# Altium footprint library SBC_PcbLib.PcbLib: 52 footprints (part 1 of 4)
Each footprint in its own frame and in the unit in brackets; x right, y up, seen from the top. Pads: shape width x height; smd on the part's side, far side on the other; paste and mask are expansions set on the pad; w line width, h text height; cw(c..) or ccw(c..) is an arc to the next point about the centre after c.
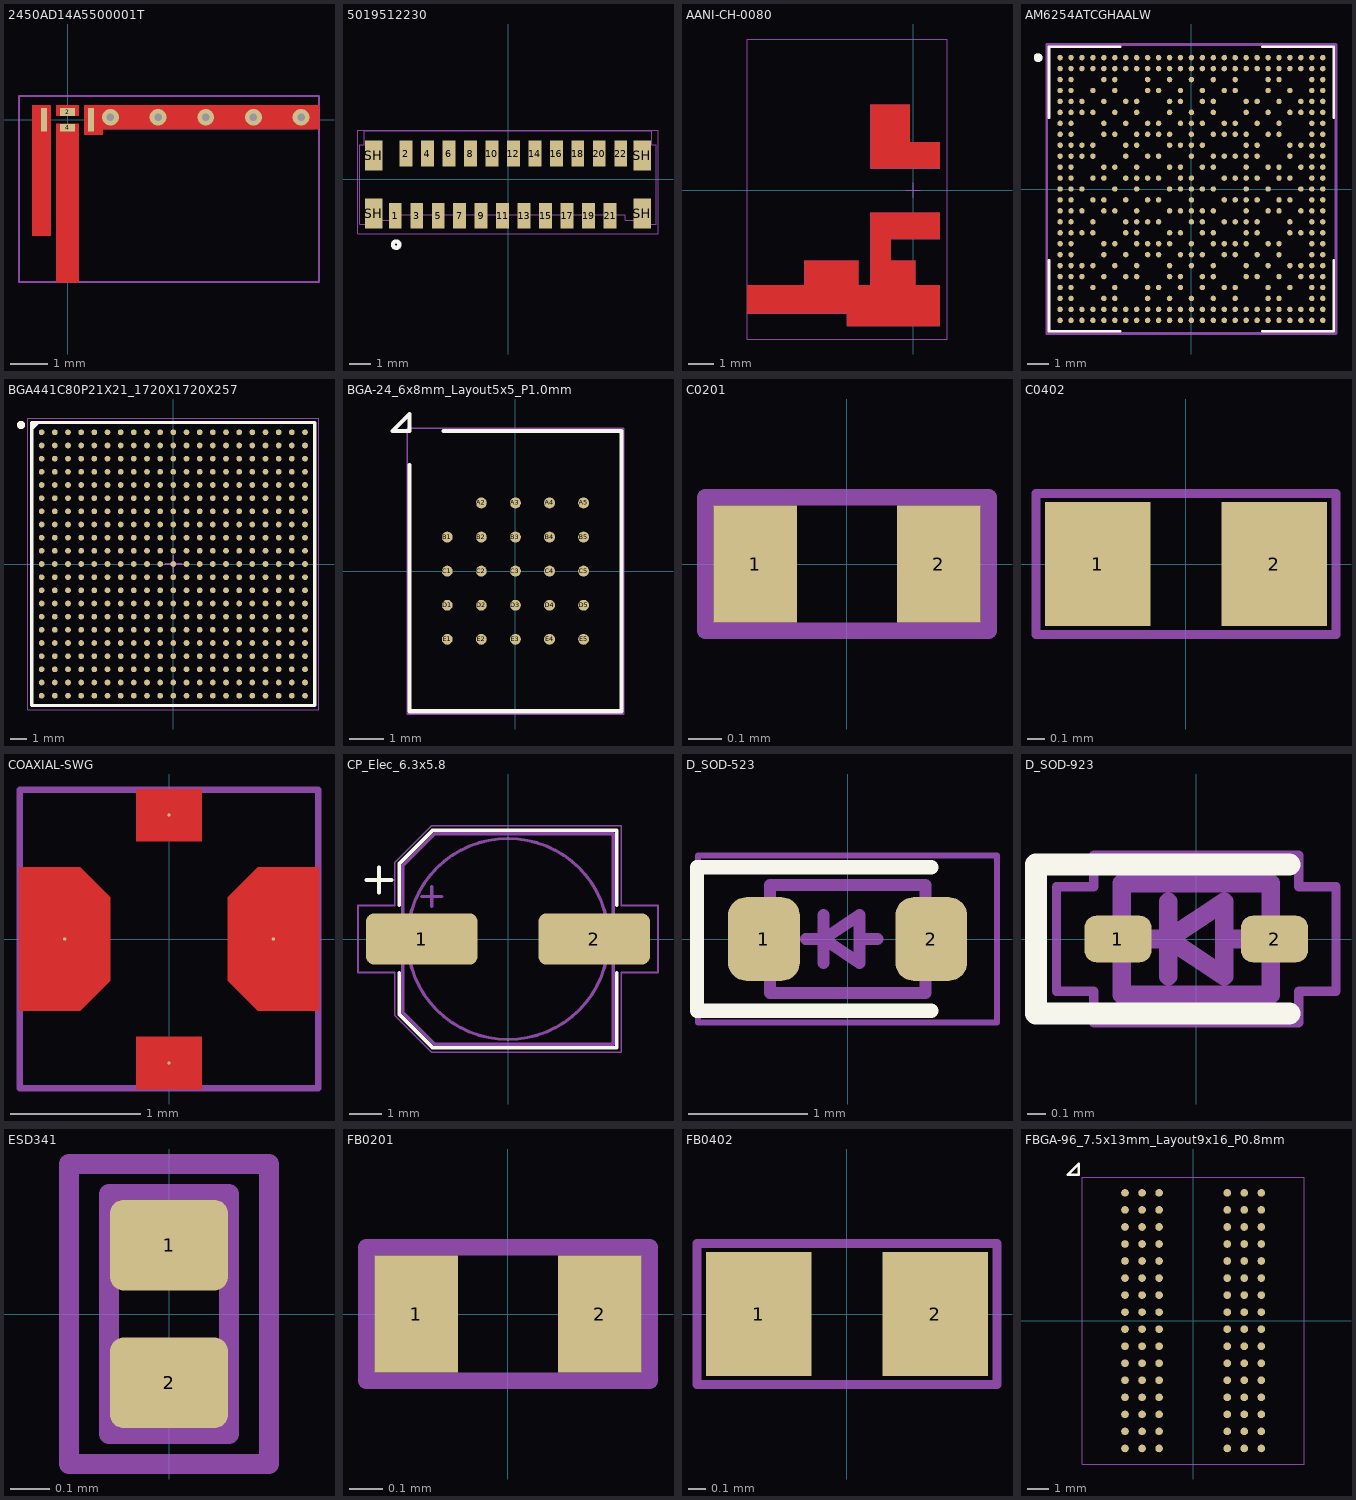
[diagram p0: the footprints below, top view; thin cyan lines are the x and y axes]

## 2450AD14A5500001T [mm]
pads (4):
  rect 0.165x0.63 smd: 1(0.633,0) 3(-0.633,0)
  rect 0.4x0.21 smd: 2(0,0.21) 4(0,-0.21)
via 1.15,0.07 diameter 0.45 hole 0.2
via 2.43,0.07 diameter 0.45 hole 0.2
via 3.71,0.07 diameter 0.45 hole 0.2
via 4.99,0.07 diameter 0.45 hole 0.2
via 6.27,0.07 diameter 0.45 hole 0.2
Top Layer:
  region: -0.95,-3.105 -0.95,0.395 -0.45,0.395 -0.45,-3.105
  region: -0.3,-4.355 0.3,-4.355 0.3,-0.105 -0.3,-0.105
  region: -0.3,0.105 -0.3,0.395 0.3,0.395 0.3,0.105
  region: 0.45,-0.405 0.95,-0.405 0.95,-0.255 6.75,-0.255 6.75,0.395 0.45,0.395
Bottom Layer:
  region: 0.95,-0.255 0.95,0.395 6.61,0.395 6.61,-0.255
Top Courtyard:
  lines w0.05: -1.303,-4.355 -1.303,0.645 6.747,0.645 6.747,-4.355 -1.303,-4.355
3D body "2450AD14A5500T--3DModel-STEP-56544.STEP": height 0.41, standoff 0.01, extent -0.8,-0.4 0.8,0.4

## 5019512230 [mm]
pads (26):
  rect 0.6x1.2 smd: 1(-5.25,-1.704) 2(-4.75,1.196) 3(-4.25,-1.704) 4(-3.75,1.196) 5(-3.25,-1.704) 6(-2.75,1.196) 7(-2.25,-1.704) 8(-1.75,1.196) 9(-1.25,-1.704) 10(-0.75,1.196) 11(-0.25,-1.704) 12(0.25,1.196) 13(0.75,-1.704) 14(1.25,1.196) 15(1.75,-1.704) 16(2.25,1.196) 17(2.75,-1.704) 18(3.25,1.196) 19(3.75,-1.704) 20(4.25,1.196) 21(4.75,-1.704) 22(5.25,1.196)
  rect 0.8x1.4 smd: SH(-6.25,-1.604) SH(-6.25,1.096) SH(6.25,-1.604) SH(6.25,1.096)
Top Overlay:
  circle w0.2: c-5.207,-3.048 r0.15
Top Courtyard:
  lines w0.05: -6.985,-2.54 -6.985,2.286 6.985,2.286 6.985,-2.54 -6.985,-2.54
Top Assembly:
  lines w0.05: -6.9,-2.104 -6.9,1.596 -6.7,1.596 -6.7,2.266 6.7,2.266 6.7,1.596 6.9,1.596 6.9,-2.104 6.35,-2.104 6.35,-2.004 6,-2.004 6,-1.904 5.45,-1.904 5.45,-1.654 -5.45,-1.654 -5.45,-1.904 -6,-1.904 -6,-2.004 -6.35,-2.004 -6.35,-2.104 -6.9,-2.104
3D body "5019512230.stp": height 4.61, standoff 0.01, extent -6.9,-2.411 6.9,1.723

## AANI-CH-0080 [mm]
Top Layer:
  region: -6.64,-4.915 -6.64,-3.805 -4.34,-3.805 -4.34,-2.815 -2.19,-2.815 -2.19,-3.805 -1.69,-3.805 -1.69,-0.895 1.06,-0.895 1.06,-1.925 -0.89,-1.925 -0.89,-2.815 0.1,-2.815 0.1,-3.805 1.06,-3.805 1.06,-5.415 -2.64,-5.415 -2.64,-4.915
  region: -1.69,0.895 -1.69,3.425 -0.14,3.425 -0.14,1.925 1.06,1.925 1.06,0.895
Top Courtyard:
  lines w0.013: -6.64,-4.915 -2.64,-4.915 -2.64,-5.415 1.06,-5.415 1.06,-4.915 1.06,-3.805 0.1,-3.805 0.1,-2.815 -0.89,-2.815 -0.89,-1.925 1.06,-1.925 1.06,-0.895 -0.89,-0.895 -1.69,-0.895 -1.69,-1.925 -1.69,-2.815 -1.69,-3.805 -2.19,-3.805 -2.19,-2.815 -4.34,-2.815 -4.34,-3.805 -6.64,-3.805 -6.64,-4.915 ; -1.69,0.895 1.06,0.895 1.06,1.925 -0.14,1.925 -0.14,3.425 -1.69,3.425 -1.69,1.925 -1.69,0.895
Bottom Courtyard:
  lines w0.013: -6.64,-5.945 -6.64,6.055 1.36,6.055 1.36,-5.945 -6.64,-5.945
Mechanical 5:
  lines w0.013: -0.3,0 0.3,0 ; 0,-0.3 0,0.3

## AM6254ATCGHAALW [mm]
height 0.89
pads (425):
  round 0.25 smd mask+0.05: A1(-6,6) A2(-5.5,6) A3(-5,6) A4(-4.5,6) A5(-4,6) A6(-3.5,6) A7(-3,6) A8(-2.5,6) A9(-2,6) A10(-1.5,6) A11(-1,6) A12(-0.5,6) A13(0,6) A14(0.5,6) A15(1,6) A16(1.5,6) A17(2,6) A18(2.5,6) A19(3,6) A20(3.5,6) A21(4,6) A22(4.5,6) A23(5,6) A24(5.5,6) A25(6,6) AA1(-6,-4) AA2(-5.5,-4) AA3(-5,-4) AA5(-4,-4) AA7(-3,-4) AA8(-2.5,-4) AA11(-1,-4) AA12(-0.5,-4) AA14(0.5,-4) AA15(1,-4) AA18(2.5,-4) AA19(3,-4) AA21(4,-4) AA23(5,-4) AA24(5.5,-4) AA25(6,-4) AB1(-6,-4.5) AB2(-5.5,-4.5) AB4(-4.5,-4.5) AB6(-3.5,-4.5) AB9(-2,-4.5) AB10(-1.5,-4.5) AB12(-0.5,-4.5) AB14(0.5,-4.5) AB16(1.5,-4.5) AB17(2,-4.5) AB20(3.5,-4.5) AB22(4.5,-4.5) AB24(5.5,-4.5) AB25(6,-4.5) AC1(-6,-5) AC2(-5.5,-5) AC5(-4,-5) AC6(-3.5,-5) AC9(-2,-5) AC11(-1,-5) AC13(0,-5) AC15(1,-5) AC17(2,-5) AC20(3.5,-5) AC21(4,-5) AC24(5.5,-5) AC25(6,-5) AD1(-6,-5.5) AD2(-5.5,-5.5) AD3(-5,-5.5) AD4(-4.5,-5.5) AD5(-4,-5.5) AD6(-3.5,-5.5) AD7(-3,-5.5) AD8(-2.5,-5.5) AD9(-2,-5.5) AD10(-1.5,-5.5) AD11(-1,-5.5) AD12(-0.5,-5.5) AD13(0,-5.5) AD14(0.5,-5.5) AD15(1,-5.5) AD16(1.5,-5.5) AD17(2,-5.5) AD18(2.5,-5.5) AD19(3,-5.5) AD20(3.5,-5.5) AD21(4,-5.5) AD22(4.5,-5.5) AD23(5,-5.5) AD24(5.5,-5.5) AD25(6,-5.5) AE1(-6,-6) AE2(-5.5,-6) AE3(-5,-6) AE4(-4.5,-6) AE5(-4,-6) AE6(-3.5,-6) AE7(-3,-6) AE8(-2.5,-6) AE9(-2,-6) AE10(-1.5,-6) AE11(-1,-6) AE12(-0.5,-6) AE13(0,-6) AE14(0.5,-6) AE15(1,-6) AE16(1.5,-6) AE17(2,-6) AE18(2.5,-6) AE19(3,-6) AE20(3.5,-6) AE21(4,-6) AE22(4.5,-6) AE23(5,-6) AE24(5.5,-6) AE25(6,-6) B1(-6,5.5) B2(-5.5,5.5) B3(-5,5.5) B4(-4.5,5.5) B5(-4,5.5) B6(-3.5,5.5) B7(-3,5.5) B8(-2.5,5.5) B9(-2,5.5) B10(-1.5,5.5) B11(-1,5.5) B12(-0.5,5.5) B13(0,5.5) B14(0.5,5.5) B15(1,5.5) B16(1.5,5.5) B17(2,5.5) B18(2.5,5.5) B19(3,5.5) B20(3.5,5.5) B21(4,5.5) B22(4.5,5.5) B23(5,5.5) B24(5.5,5.5) B25(6,5.5) C1(-6,5) C2(-5.5,5) C5(-4,5) C6(-3.5,5) C9(-2,5) C11(-1,5) C13(0,5) C15(1,5) C17(2,5) C20(3.5,5) C21(4,5) C24(5.5,5) C25(6,5) D1(-6,4.5) D2(-5.5,4.5) D4(-4.5,4.5) D6(-3.5,4.5) D9(-2,4.5) D10(-1.5,4.5) D12(-0.5,4.5) D14(0.5,4.5) D16(1.5,4.5) D17(2,4.5) D20(3.5,4.5) D22(4.5,4.5) D24(5.5,4.5) D25(6,4.5) E1(-6,4) E2(-5.5,4) E3(-5,4) E5(-4,4) E7(-3,4) E8(-2.5,4) E11(-1,4) E12(-0.5,4) E14(0.5,4) E15(1,4) E18(2.5,4) E19(3,4) E21(4,4) E23(5,4) E24(5.5,4) E25(6,4) F1(-6,3.5) F2(-5.5,3.5) F3(-5,3.5) F4(-4.5,3.5) F6(-3.5,3.5) F8(-2.5,3.5) F11(-1,3.5) F13(0,3.5) F15(1,3.5) F18(2.5,3.5) F20(3.5,3.5) F22(4.5,3.5) F23(5,3.5) F24(5.5,3.5) F25(6,3.5) G1(-6,3) G2(-5.5,3) G5(-4,3) G7(-3,3) G9(-2,3) G10(-1.5,3) G12(-0.5,3) G13(0,3) G14(0.5,3) G16(1.5,3) G17(2,3) G19(3,3) G21(4,3) G24(5.5,3) G25(6,3) H1(-6,2.5) H2(-5.5,2.5) H5(-4,2.5) H6(-3.5,2.5) H8(-2.5,2.5) H9(-2,2.5) H10(-1.5,2.5) H11(-1,2.5) H13(0,2.5) H15(1,2.5) H16(1.5,2.5) H17(2,2.5) H18(2.5,2.5) H20(3.5,2.5) H21(4,2.5) H24(5.5,2.5) H25(6,2.5) J1(-6,2) J2(-5.5,2) J3(-5,2) J4(-4.5,2) J7(-3,2) J8(-2.5,2) J11(-1,2) J12(-0.5,2) J13(0,2) J14(0.5,2) J18(2.5,2) J19(3,2) J22(4.5,2) J23(5,2) J24(5.5,2) J25(6,2) K1(-6,1.5) K2(-5.5,1.5) K3(-5,1.5) K4(-4.5,1.5) K7(-3,1.5) K9(-2,1.5) K10(-1.5,1.5) K13(0,1.5) K15(1,1.5) K16(1.5,1.5) K17(2,1.5) K18(2.5,1.5) K19(3,1.5) K22(4.5,1.5) K24(5.5,1.5) K25(6,1.5) L1(-6,1) L2(-5.5,1) L5(-4,1) L6(-3.5,1) L8(-2.5,1) L11(-1,1) L12(-0.5,1) L14(0.5,1) L15(1,1) L18(2.5,1) L20(3.5,1) L21(4,1) L23(5,1) L24(5.5,1) L25(6,1) M1(-6,0.5) M2(-5.5,0.5) M4(-4.5,0.5) M5(-4,0.5) M7(-3,0.5) M8(-2.5,0.5) M9(-2,0.5) M10(-1.5,0.5) M12(-0.5,0.5) M13(0,0.5) M16(1.5,0.5) M17(2,0.5) M18(2.5,0.5) M19(3,0.5) M21(4,0.5) M22(4.5,0.5) M24(5.5,0.5) M25(6,0.5) N1(-6,0) N2(-5.5,0) N3(-5,0) N6(-3.5,0) N8(-2.5,0) N11(-1,0) N12(-0.5,0) N13(0,0) N14(0.5,0) N15(1,0) N18(2.5,0) N20(3.5,0) N23(5,0) N24(5.5,0) N25(6,0) P1(-6,-0.5) P2(-5.5,-0.5) P4(-4.5,-0.5) P5(-4,-0.5) P7(-3,-0.5) P9(-2,-0.5) P10(-1.5,-0.5) P13(0,-0.5) P16(1.5,-0.5) P17(2,-0.5) P18(2.5,-0.5) P19(3,-0.5) P21(4,-0.5) P22(4.5,-0.5) P24(5.5,-0.5) P25(6,-0.5) R1(-6,-1) R2(-5.5,-1) R3(-5,-1) R5(-4,-1) R6(-3.5,-1) R8(-2.5,-1) R11(-1,-1) R12(-0.5,-1) R13(0,-1) R14(0.5,-1) R15(1,-1) R18(2.5,-1) R20(3.5,-1) R21(4,-1) R23(5,-1) R24(5.5,-1) R25(6,-1) T1(-6,-1.5) T2(-5.5,-1.5) T4(-4.5,-1.5) T7(-3,-1.5) T8(-2.5,-1.5) T9(-2,-1.5) T10(-1.5,-1.5) T13(0,-1.5) T14(0.5,-1.5) T16(1.5,-1.5) T17(2,-1.5) T18(2.5,-1.5) T19(3,-1.5) T22(4.5,-1.5) T24(5.5,-1.5) T25(6,-1.5) U1(-6,-2) U2(-5.5,-2) U3(-5,-2) U4(-4.5,-2) U7(-3,-2) U8(-2.5,-2) U11(-1,-2) U12(-0.5,-2) U14(0.5,-2) U15(1,-2) U18(2.5,-2) U19(3,-2) U22(4.5,-2) U23(5,-2) U24(5.5,-2) U25(6,-2) V1(-6,-2.5) V2(-5.5,-2.5) V5(-4,-2.5) V6(-3.5,-2.5) V8(-2.5,-2.5) V9(-2,-2.5) V10(-1.5,-2.5) V11(-1,-2.5) V13(0,-2.5) V15(1,-2.5) V16(1.5,-2.5) V17(2,-2.5) V18(2.5,-2.5) V20(3.5,-2.5) V21(4,-2.5) V24(5.5,-2.5) V25(6,-2.5) W1(-6,-3) W2(-5.5,-3) W5(-4,-3) W7(-3,-3) W9(-2,-3) W10(-1.5,-3) W12(-0.5,-3) W13(0,-3) W14(0.5,-3) W16(1.5,-3) W17(2,-3) W19(3,-3) W21(4,-3) W24(5.5,-3) W25(6,-3) Y1(-6,-3.5) Y2(-5.5,-3.5) Y3(-5,-3.5) Y4(-4.5,-3.5) Y6(-3.5,-3.5) Y8(-2.5,-3.5) Y11(-1,-3.5) Y13(0,-3.5) Y15(1,-3.5) Y18(2.5,-3.5) Y20(3.5,-3.5) Y22(4.5,-3.5) Y23(5,-3.5) Y24(5.5,-3.5) Y25(6,-3.5)
Top Overlay:
  circle w0.2: c-7,6 r0.1
  lines w0.127: -6.5,-3.25 -6.5,-6.5 -3.25,-6.5 ; -6.5,3.25 -6.5,6.5 -3.25,6.5 ; 3.25,-6.5 6.5,-6.5 6.5,-3.25 ; 3.25,6.5 6.5,6.5 6.5,3.25
Top Courtyard:
  lines w0.127: -6.604,-6.604 -6.604,6.604 6.604,6.604 6.604,-6.604 -6.604,-6.604
Top 3D Body:
  circle w0.2: c-7,6 r0.1
3D body "AM6254ATCGHAALW.step": height 0.89, standoff 0, extent -6.5,-6.5 6.5,6.5

## BGA441C80P21X21_1720X1720X257 [mm] "BGA, 441-Leads, Body 17.20x17.20mmx2.57mm, Pitch 0.80mm"
height 2.57
pads (441):
  round 0.35 smd: A1(-8,8) A2(-7.2,8) A3(-6.4,8) A4(-5.6,8) A5(-4.8,8) A6(-4,8) A7(-3.2,8) A8(-2.4,8) A9(-1.6,8) A10(-0.8,8) A11(0,8) A12(0.8,8) A13(1.6,8) A14(2.4,8) A15(3.2,8) A16(4,8) A17(4.8,8) A18(5.6,8) A19(6.4,8) A20(7.2,8) A21(8,8) AA1(-8,-8) AA2(-7.2,-8) AA3(-6.4,-8) AA4(-5.6,-8) AA5(-4.8,-8) AA6(-4,-8) AA7(-3.2,-8) AA8(-2.4,-8) AA9(-1.6,-8) AA10(-0.8,-8) AA11(0,-8) AA12(0.8,-8) AA13(1.6,-8) AA14(2.4,-8) AA15(3.2,-8) AA16(4,-8) AA17(4.8,-8) AA18(5.6,-8) AA19(6.4,-8) AA20(7.2,-8) AA21(8,-8) B1(-8,7.2) B2(-7.2,7.2) B3(-6.4,7.2) B4(-5.6,7.2) B5(-4.8,7.2) B6(-4,7.2) B7(-3.2,7.2) B8(-2.4,7.2) B9(-1.6,7.2) B10(-0.8,7.2) B11(0,7.2) B12(0.8,7.2) B13(1.6,7.2) B14(2.4,7.2) B15(3.2,7.2) B16(4,7.2) B17(4.8,7.2) B18(5.6,7.2) B19(6.4,7.2) B20(7.2,7.2) B21(8,7.2) C1(-8,6.4) C2(-7.2,6.4) C3(-6.4,6.4) C4(-5.6,6.4) C5(-4.8,6.4) C6(-4,6.4) C7(-3.2,6.4) C8(-2.4,6.4) C9(-1.6,6.4) C10(-0.8,6.4) C11(0,6.4) C12(0.8,6.4) C13(1.6,6.4) C14(2.4,6.4) C15(3.2,6.4) C16(4,6.4) C17(4.8,6.4) C18(5.6,6.4) C19(6.4,6.4) C20(7.2,6.4) C21(8,6.4) D1(-8,5.6) D2(-7.2,5.6) D3(-6.4,5.6) D4(-5.6,5.6) D5(-4.8,5.6) D6(-4,5.6) D7(-3.2,5.6) D8(-2.4,5.6) D9(-1.6,5.6) D10(-0.8,5.6) D11(0,5.6) D12(0.8,5.6) D13(1.6,5.6) D14(2.4,5.6) D15(3.2,5.6) D16(4,5.6) D17(4.8,5.6) D18(5.6,5.6) D19(6.4,5.6) D20(7.2,5.6) D21(8,5.6) E1(-8,4.8) E2(-7.2,4.8) E3(-6.4,4.8) E4(-5.6,4.8) E5(-4.8,4.8) E6(-4,4.8) E7(-3.2,4.8) E8(-2.4,4.8) E9(-1.6,4.8) E10(-0.8,4.8) E11(0,4.8) E12(0.8,4.8) E13(1.6,4.8) E14(2.4,4.8) E15(3.2,4.8) E16(4,4.8) E17(4.8,4.8) E18(5.6,4.8) E19(6.4,4.8) E20(7.2,4.8) E21(8,4.8) F1(-8,4) F2(-7.2,4) F3(-6.4,4) F4(-5.6,4) F5(-4.8,4) F6(-4,4) F7(-3.2,4) F8(-2.4,4) F9(-1.6,4) F10(-0.8,4) F11(0,4) F12(0.8,4) F13(1.6,4) F14(2.4,4) F15(3.2,4) F16(4,4) F17(4.8,4) F18(5.6,4) F19(6.4,4) F20(7.2,4) F21(8,4) G1(-8,3.2) G2(-7.2,3.2) G3(-6.4,3.2) G4(-5.6,3.2) G5(-4.8,3.2) G6(-4,3.2) G7(-3.2,3.2) G8(-2.4,3.2) G9(-1.6,3.2) G10(-0.8,3.2) G11(0,3.2) G12(0.8,3.2) G13(1.6,3.2) G14(2.4,3.2) G15(3.2,3.2) G16(4,3.2) G17(4.8,3.2) G18(5.6,3.2) G19(6.4,3.2) G20(7.2,3.2) G21(8,3.2) H1(-8,2.4) H2(-7.2,2.4) H3(-6.4,2.4) H4(-5.6,2.4) H5(-4.8,2.4) H6(-4,2.4) H7(-3.2,2.4) H8(-2.4,2.4) H9(-1.6,2.4) H10(-0.8,2.4) H11(0,2.4) H12(0.8,2.4) H13(1.6,2.4) H14(2.4,2.4) H15(3.2,2.4) H16(4,2.4) H17(4.8,2.4) H18(5.6,2.4) H19(6.4,2.4) H20(7.2,2.4) H21(8,2.4) J1(-8,1.6) J2(-7.2,1.6) J3(-6.4,1.6) J4(-5.6,1.6) J5(-4.8,1.6) J6(-4,1.6) J7(-3.2,1.6) J8(-2.4,1.6) J9(-1.6,1.6) J10(-0.8,1.6) J11(0,1.6) J12(0.8,1.6) J13(1.6,1.6) J14(2.4,1.6) J15(3.2,1.6) J16(4,1.6) J17(4.8,1.6) J18(5.6,1.6) J19(6.4,1.6) J20(7.2,1.6) J21(8,1.6) K1(-8,0.8) K2(-7.2,0.8) K3(-6.4,0.8) K4(-5.6,0.8) K5(-4.8,0.8) K6(-4,0.8) K7(-3.2,0.8) K8(-2.4,0.8) K9(-1.6,0.8) K10(-0.8,0.8) K11(0,0.8) K12(0.8,0.8) K13(1.6,0.8) K14(2.4,0.8) K15(3.2,0.8) K16(4,0.8) K17(4.8,0.8) K18(5.6,0.8) K19(6.4,0.8) K20(7.2,0.8) K21(8,0.8) L1(-8,0) L2(-7.2,0) L3(-6.4,0) L4(-5.6,0) L5(-4.8,0) L6(-4,0) L7(-3.2,0) L8(-2.4,0) L9(-1.6,0) L10(-0.8,0) L11(0,0) L12(0.8,0) L13(1.6,0) L14(2.4,0) L15(3.2,0) L16(4,0) L17(4.8,0) L18(5.6,0) L19(6.4,0) L20(7.2,0) L21(8,0) M1(-8,-0.8) M2(-7.2,-0.8) M3(-6.4,-0.8) M4(-5.6,-0.8) M5(-4.8,-0.8) M6(-4,-0.8) M7(-3.2,-0.8) M8(-2.4,-0.8) M9(-1.6,-0.8) M10(-0.8,-0.8) M11(0,-0.8) M12(0.8,-0.8) M13(1.6,-0.8) M14(2.4,-0.8) M15(3.2,-0.8) M16(4,-0.8) M17(4.8,-0.8) M18(5.6,-0.8) M19(6.4,-0.8) M20(7.2,-0.8) M21(8,-0.8) N1(-8,-1.6) N2(-7.2,-1.6) N3(-6.4,-1.6) N4(-5.6,-1.6) N5(-4.8,-1.6) N6(-4,-1.6) N7(-3.2,-1.6) N8(-2.4,-1.6) N9(-1.6,-1.6) N10(-0.8,-1.6) N11(0,-1.6) N12(0.8,-1.6) N13(1.6,-1.6) N14(2.4,-1.6) N15(3.2,-1.6) N16(4,-1.6) N17(4.8,-1.6) N18(5.6,-1.6) N19(6.4,-1.6) N20(7.2,-1.6) N21(8,-1.6) P1(-8,-2.4) P2(-7.2,-2.4) P3(-6.4,-2.4) P4(-5.6,-2.4) P5(-4.8,-2.4) P6(-4,-2.4) P7(-3.2,-2.4) P8(-2.4,-2.4) P9(-1.6,-2.4) P10(-0.8,-2.4) P11(0,-2.4) P12(0.8,-2.4) P13(1.6,-2.4) P14(2.4,-2.4) P15(3.2,-2.4) P16(4,-2.4) P17(4.8,-2.4) P18(5.6,-2.4) P19(6.4,-2.4) P20(7.2,-2.4) P21(8,-2.4) R1(-8,-3.2) R2(-7.2,-3.2) R3(-6.4,-3.2) R4(-5.6,-3.2) R5(-4.8,-3.2) R6(-4,-3.2) R7(-3.2,-3.2) R8(-2.4,-3.2) R9(-1.6,-3.2) R10(-0.8,-3.2) R11(0,-3.2) R12(0.8,-3.2) R13(1.6,-3.2) R14(2.4,-3.2) R15(3.2,-3.2) R16(4,-3.2) R17(4.8,-3.2) R18(5.6,-3.2) R19(6.4,-3.2) R20(7.2,-3.2) R21(8,-3.2) T1(-8,-4) T2(-7.2,-4) T3(-6.4,-4) T4(-5.6,-4) T5(-4.8,-4) T6(-4,-4) T7(-3.2,-4) T8(-2.4,-4) T9(-1.6,-4) T10(-0.8,-4) T11(0,-4) T12(0.8,-4) T13(1.6,-4) T14(2.4,-4) T15(3.2,-4) T16(4,-4) T17(4.8,-4) T18(5.6,-4) T19(6.4,-4) T20(7.2,-4) T21(8,-4) U1(-8,-4.8) U2(-7.2,-4.8) U3(-6.4,-4.8) U4(-5.6,-4.8) U5(-4.8,-4.8) U6(-4,-4.8) U7(-3.2,-4.8) U8(-2.4,-4.8) U9(-1.6,-4.8) U10(-0.8,-4.8) U11(0,-4.8) U12(0.8,-4.8) U13(1.6,-4.8) U14(2.4,-4.8) U15(3.2,-4.8) U16(4,-4.8) U17(4.8,-4.8) U18(5.6,-4.8) U19(6.4,-4.8) U20(7.2,-4.8) U21(8,-4.8) V1(-8,-5.6) V2(-7.2,-5.6) V3(-6.4,-5.6) V4(-5.6,-5.6) V5(-4.8,-5.6) V6(-4,-5.6) V7(-3.2,-5.6) V8(-2.4,-5.6) V9(-1.6,-5.6) V10(-0.8,-5.6) V11(0,-5.6) V12(0.8,-5.6) V13(1.6,-5.6) V14(2.4,-5.6) V15(3.2,-5.6) V16(4,-5.6) V17(4.8,-5.6) V18(5.6,-5.6) V19(6.4,-5.6) V20(7.2,-5.6) V21(8,-5.6) W1(-8,-6.4) W2(-7.2,-6.4) W3(-6.4,-6.4) W4(-5.6,-6.4) W5(-4.8,-6.4) W6(-4,-6.4) W7(-3.2,-6.4) W8(-2.4,-6.4) W9(-1.6,-6.4) W10(-0.8,-6.4) W11(0,-6.4) W12(0.8,-6.4) W13(1.6,-6.4) W14(2.4,-6.4) W15(3.2,-6.4) W16(4,-6.4) W17(4.8,-6.4) W18(5.6,-6.4) W19(6.4,-6.4) W20(7.2,-6.4) W21(8,-6.4) Y1(-8,-7.2) Y2(-7.2,-7.2) Y3(-6.4,-7.2) Y4(-5.6,-7.2) Y5(-4.8,-7.2) Y6(-4,-7.2) Y7(-3.2,-7.2) Y8(-2.4,-7.2) Y9(-1.6,-7.2) Y10(-0.8,-7.2) Y11(0,-7.2) Y12(0.8,-7.2) Y13(1.6,-7.2) Y14(2.4,-7.2) Y15(3.2,-7.2) Y16(4,-7.2) Y17(4.8,-7.2) Y18(5.6,-7.2) Y19(6.4,-7.2) Y20(7.2,-7.2) Y21(8,-7.2)
Top Overlay:
  circle w0.25: c-9.25,8.45 r0.125
  region: -8.213,8.6 -8.6,8.213 -8.6,8.6
  lines w0.2: -8.6,8.213 -8.213,8.6 ; -8.6,-8.6 8.6,-8.6 8.6,8.6 -8.6,8.6 -8.6,-8.6
Top Courtyard:
  lines w0.05: -8.85,-8.85 8.85,-8.85 8.85,8.85 -8.85,8.85 -8.85,-8.85
  lines w0.1: -0.5,0 0.5,0 ; 0,-0.5 0,0.5
Top Assembly:
  lines w0.1: -8.6,-8.6 8.6,-8.6 8.6,8.6 -8.6,8.6 -8.6,-8.6
3D body: height 2.57, standoff 0.3, extent -8.6,-8.6 8.6,8.6

## BGA-24_6x8mm_Layout5x5_P1.0mm [mm] "BGA-24, 6x8mm, 24 Ball, 5x5 Layout, 1.0mm Pitch, https://www.issi.com/WW/pdf/66-67WVO32M8DALL-BLL.pdf#page=32"
pads (24):
  round 0.32 smd: A2(-1,2) A3(0,2) A4(1,2) A5(2,2) B1(-2,1) B2(-1,1) B3(0,1) B4(1,1) B5(2,1) C1(-2,0) C2(-1,0) C3(0,0) C4(1,0) C5(2,0) D1(-2,-1) D2(-1,-1) D3(0,-1) D4(1,-1) D5(2,-1) E1(-2,-2) E2(-1,-2) E3(0,-2) E4(1,-2) E5(2,-2)
Top Overlay:
  lines w0.12: -3.11,3.11 -3.11,-4.11 3.11,-4.11 3.11,4.11 -2.11,4.11 ; -3.61,4.11 -3.11,4.11 -3.11,4.61 -3.61,4.11
Top Courtyard:
  lines w0.05: -3.175,-4.191 -3.175,4.191 3.175,4.191 3.175,-4.191 -3.175,-4.191
Top Assembly:
  text ".Designator" at -4.445,-0.381 h1

## C0201 [mm]
pads (2):
  rect 0.25x0.35 smd: 1(-0.275,0) 2(0.275,0)
Top Courtyard:
  lines w0.05: -0.425,-0.2 -0.425,0 -0.425,0.2 0.425,0.2 0.425,-0.2 -0.425,-0.2
Top Assembly:
  text ".Designator" at -1.016,-0.635 h0.5
3D body "C_0201_0603Metric.step": height 0.3, standoff 0, extent -0.3,-0.15 0.3,0.15

## C0402 [mm]
pads (2):
  rect 0.6x0.7 smd: 1(-0.5,0) 2(0.5,0)
Top Courtyard:
  lines w0.05: -0.85,-0.4 0.85,-0.4 0.85,0.4 -0.85,0.4 -0.85,0 -0.85,-0.4
Top Assembly:
  text ".Designator" at -1.016,-0.127 h0.5
3D body "C_0402_1005Metric.step": height 0.5, standoff 0, extent -0.5,-0.25 0.5,0.25

## COAXIAL-SWG [mil]
pads (6):
  round 1 smd mask+4: 1(0,37.4) 3(0,-37.4)
  round 1 smd mask+0: 2(-31.5,0) 4(31.5,0)
  round 1 on Top Solder: 3(0,-28.94) 3(0,28.94)
Top Layer:
  region: 17.72,-12.6 26.77,-21.65 45.28,-21.65 45.28,21.65 26.77,21.65 17.72,12.6
  region: -45.28,-21.65 -26.77,-21.65 -17.72,-12.6 -17.72,12.6 -26.77,21.65 -45.28,21.65
  region: -9.84,29.53 -9.84,45.28 9.84,45.28 9.84,29.53
  region: -9.84,-45.28 9.84,-45.28 9.84,-29.53 -9.84,-29.53
Top Solder:
  region: -19.68,21.65 -9.84,12.6 9.84,12.6 19.68,21.65 19.68,45.28 -19.68,45.28
  region: -19.68,-45.28 19.68,-45.28 19.68,-21.65 9.84,-12.6 -9.84,-12.6 -19.68,-21.65
Top Courtyard:
  lines w1.97: -45,-45 45,-45 45,45 -45,45 -45,-45
Top Assembly:
  text ".Designator" at -40,-5 h19.68
3D body "MM8030-2610RK0_recentered.STEP": height 35.93, standoff -0.29, extent -39.37,-41.34 39.37,41.34

## CP_Elec_6.3x5.8 [mm] "SMD capacitor, aluminum electrolytic, Nichicon, 6.3x5.8mm"
pads (2):
  rrect31% 3.5x1.6 smd: 1(-2.7,0) 2(2.7,0)
Top Overlay:
  lines w0.12: -4.437,1.847 -3.65,1.847 ; -4.044,1.454 -4.044,2.241 ; -3.41,-1.06 -3.41,-2.346 -2.346,-3.41 3.41,-3.41 3.41,-1.06 ; -3.41,1.06 -3.41,2.346 -2.346,3.41 3.41,3.41 3.41,1.06
Mechanical 2:
  lines w0.1: -2.705,1.33 -2.075,1.33 ; -2.39,1.015 -2.39,1.645
Top Courtyard:
  lines w0.05: -4.7,-1.05 -4.7,1.05 -3.55,1.05 -3.55,2.4 -2.4,3.55 3.55,3.55 3.55,1.05 4.7,1.05 4.7,-1.05 3.55,-1.05 3.55,-3.55 -2.4,-3.55 -3.55,-2.4 -3.55,-1.05 -4.7,-1.05
Top Assembly:
  circle w0.1: c0,0 r3.15
  lines w0.1: -3.3,-2.3 -2.3,-3.3 3.3,-3.3 3.3,3.3 -2.3,3.3 -3.3,2.3 -3.3,-2.3
  text ".Designator" at -3.937,-4.572 h1

## D_SOD-523 [mm] "http://www.diodes.com/datasheets/ap02001.pdf p.144"
pads (2):
  rrect50% 0.6x0.7 smd: 1(-0.7,0) 2(0.7,0)
Top Overlay:
  lines w0.12: 0.7,-0.6 -1.26,-0.6 -1.26,0.6 0.7,0.6
Top Courtyard:
  lines w0.05: -1.25,-0.7 -1.25,0.7 1.25,0.7 1.25,-0.7 -1.25,-0.7
Top Assembly:
  lines w0.1: -0.35,0 -0.2,0 ; -0.2,-0.2 -0.2,0.2 ; 0.1,0 0.25,0 ; -0.2,0 0.1,0.2 0.1,-0.2 -0.2,0 ; -0.65,-0.45 0.65,-0.45 0.65,0.45 -0.65,0.45 -0.65,-0.45
  text ".Designator" at -2.54,1.651 h1
3D body "D_SOD-523.step": height 0.63, standoff 0, extent -0.8,-0.4 0.8,0.4

## D_SOD-923 [mm] "https://www.onsemi.com/pub/Collateral/ESD9B-D.PDF#page=4"
pads (2):
  rrect50% 0.36x0.25 smd: 1(-0.42,0) 2(0.42,0)
Top Overlay:
  lines w0.12: 0.5,-0.4 -0.86,-0.4 -0.86,0.4 0.5,0.4
Top Courtyard:
  lines w0.05: -0.75,-0.28 -0.75,0.28 -0.55,0.28 -0.55,0.45 0.55,0.45 0.55,0.28 0.75,0.28 0.75,-0.28 0.55,-0.28 0.55,-0.45 -0.55,-0.45 -0.55,-0.28 -0.75,-0.28
Top Assembly:
  lines w0.1: -0.25,0 -0.15,0 ; -0.15,-0.2 -0.15,0.2 ; 0.15,0 0.25,0 ; -0.15,0 0.15,-0.2 0.15,0.2 -0.15,0 ; -0.4,-0.3 0.4,-0.3 0.4,0.3 -0.4,0.3 -0.4,-0.3
  text ".Designator" at -3.937,0.762 h1
3D body "D_SOD-923.step": height 0.37, standoff 0, extent -0.5,-0.3 0.5,0.3

## ESD341 [mm]
pads (2):
  rrect30% 0.3x0.23 smd: 1(0,0.175) 2(0,-0.175)
Top Courtyard:
  lines w0.05: -0.254,-0.381 0.254,-0.381 0.254,0.381 -0.254,0.381 -0.254,-0.381
Mechanical 15:
  lines w0.05: -0.152,-0.305 0.152,-0.305 0.152,0.305 -0.152,0.305 -0.152,-0.305
Top Assembly:
  text ".Designator" at -4.318,-1.651 h1
3D body "ESD341DPLR.stp": height 0.3, standoff -0.03, extent -0.15,-0.3 0.15,0.3

## FB0201 [mm]
pads (2):
  rect 0.25x0.35 smd: 1(-0.275,0) 2(0.275,0)
Top Courtyard:
  lines w0.05: -0.425,-0.2 0.425,-0.2 0.425,0.2 -0.425,0.2 -0.425,0 -0.425,-0.2
Top Assembly:
  text ".Designator" at -1.016,-0.635 h0.5
3D body "L_0201_0603Metric.step": height 0.3, standoff 0, extent -0.3,-0.15 0.3,0.15

## FB0402 [mm]
pads (2):
  rect 0.6x0.7 smd: 1(-0.5,0) 2(0.5,0)
Top Courtyard:
  lines w0.05: -0.85,-0.4 -0.85,0 -0.85,0.4 0.85,0.4 0.85,-0.4 -0.85,-0.4
Top Assembly:
  text ".Designator" at -1.016,-0.127 h0.5
3D body "L_0402_1005Metric.step": height 0.5, standoff 0, extent -0.5,-0.25 0.5,0.25

## FBGA-96_7.5x13mm_Layout9x16_P0.8mm [mm] "FBGA-96, 8.0x14.0mm, 96 Ball, 9x16 Layout, 0.8mm Pitch, generalized from https://www.micron.com/-/media/client/global/documents/products/data-sheet/dram/ddr3/4gb_ddr3l.pdf#page=28"
pads (96):
  round 0.36 smd: A1(3.2,6) A2(2.4,6) A3(1.6,6) A7(-1.6,6) A8(-2.4,6) A9(-3.2,6) B1(3.2,5.2) B2(2.4,5.2) B3(1.6,5.2) B7(-1.6,5.2) B8(-2.4,5.2) B9(-3.2,5.2) C1(3.2,4.4) C2(2.4,4.4) C3(1.6,4.4) C7(-1.6,4.4) C8(-2.4,4.4) C9(-3.2,4.4) D1(3.2,3.6) D2(2.4,3.6) D3(1.6,3.6) D7(-1.6,3.6) D8(-2.4,3.6) D9(-3.2,3.6) E1(3.2,2.8) E2(2.4,2.8) E3(1.6,2.8) E7(-1.6,2.8) E8(-2.4,2.8) E9(-3.2,2.8) F1(3.2,2) F2(2.4,2) F3(1.6,2) F7(-1.6,2) F8(-2.4,2) F9(-3.2,2) G1(3.2,1.2) G2(2.4,1.2) G3(1.6,1.2) G7(-1.6,1.2) G8(-2.4,1.2) G9(-3.2,1.2) H1(3.2,0.4) H2(2.4,0.4) H3(1.6,0.4) H7(-1.6,0.4) H8(-2.4,0.4) H9(-3.2,0.4) J1(3.2,-0.4) J2(2.4,-0.4) J3(1.6,-0.4) J7(-1.6,-0.4) J8(-2.4,-0.4) J9(-3.2,-0.4) K1(3.2,-1.2) K2(2.4,-1.2) K3(1.6,-1.2) K7(-1.6,-1.2) K8(-2.4,-1.2) K9(-3.2,-1.2) L1(3.2,-2) L2(2.4,-2) L3(1.6,-2) L7(-1.6,-2) L8(-2.4,-2) L9(-3.2,-2) M1(3.2,-2.8) M2(2.4,-2.8) M3(1.6,-2.8) M7(-1.6,-2.8) M8(-2.4,-2.8) M9(-3.2,-2.8) N1(3.2,-3.6) N2(2.4,-3.6) N3(1.6,-3.6) N7(-1.6,-3.6) N8(-2.4,-3.6) N9(-3.2,-3.6) P1(3.2,-4.4) P2(2.4,-4.4) P3(1.6,-4.4) P7(-1.6,-4.4) P8(-2.4,-4.4) P9(-3.2,-4.4) R1(3.2,-5.2) R2(2.4,-5.2) R3(1.6,-5.2) R7(-1.6,-5.2) R8(-2.4,-5.2) R9(-3.2,-5.2) T1(3.2,-6) T2(2.4,-6) T3(1.6,-6) T7(-1.6,-6) T8(-2.4,-6) T9(-3.2,-6)
Top Overlay:
  lines w0.12: -5.88,6.856 -5.38,6.856 -5.38,7.356 -5.88,6.856
Top Courtyard:
  lines w0.05: -5.207,-6.731 -5.207,6.731 5.207,6.731 5.207,-6.731 -5.207,-6.731
Top Assembly:
  text ".Designator" at -1.905,-1.397 h1
3D body "K4AAG165WA-BCWE.step": height 1.1, standoff 0, extent -5.15,-6.65 5.15,6.65